# Altium footprint library basicfootprints.PcbLib: 522 footprints (part 5 of 33)
Each footprint in its own frame and in the unit in brackets; x right, y up, seen from the top. Pads: shape width x height; smd on the part's side, far side on the other; paste and mask are expansions set on the pad; w line width, h text height; cw(c..) or ccw(c..) is an arc to the next point about the centre after c.
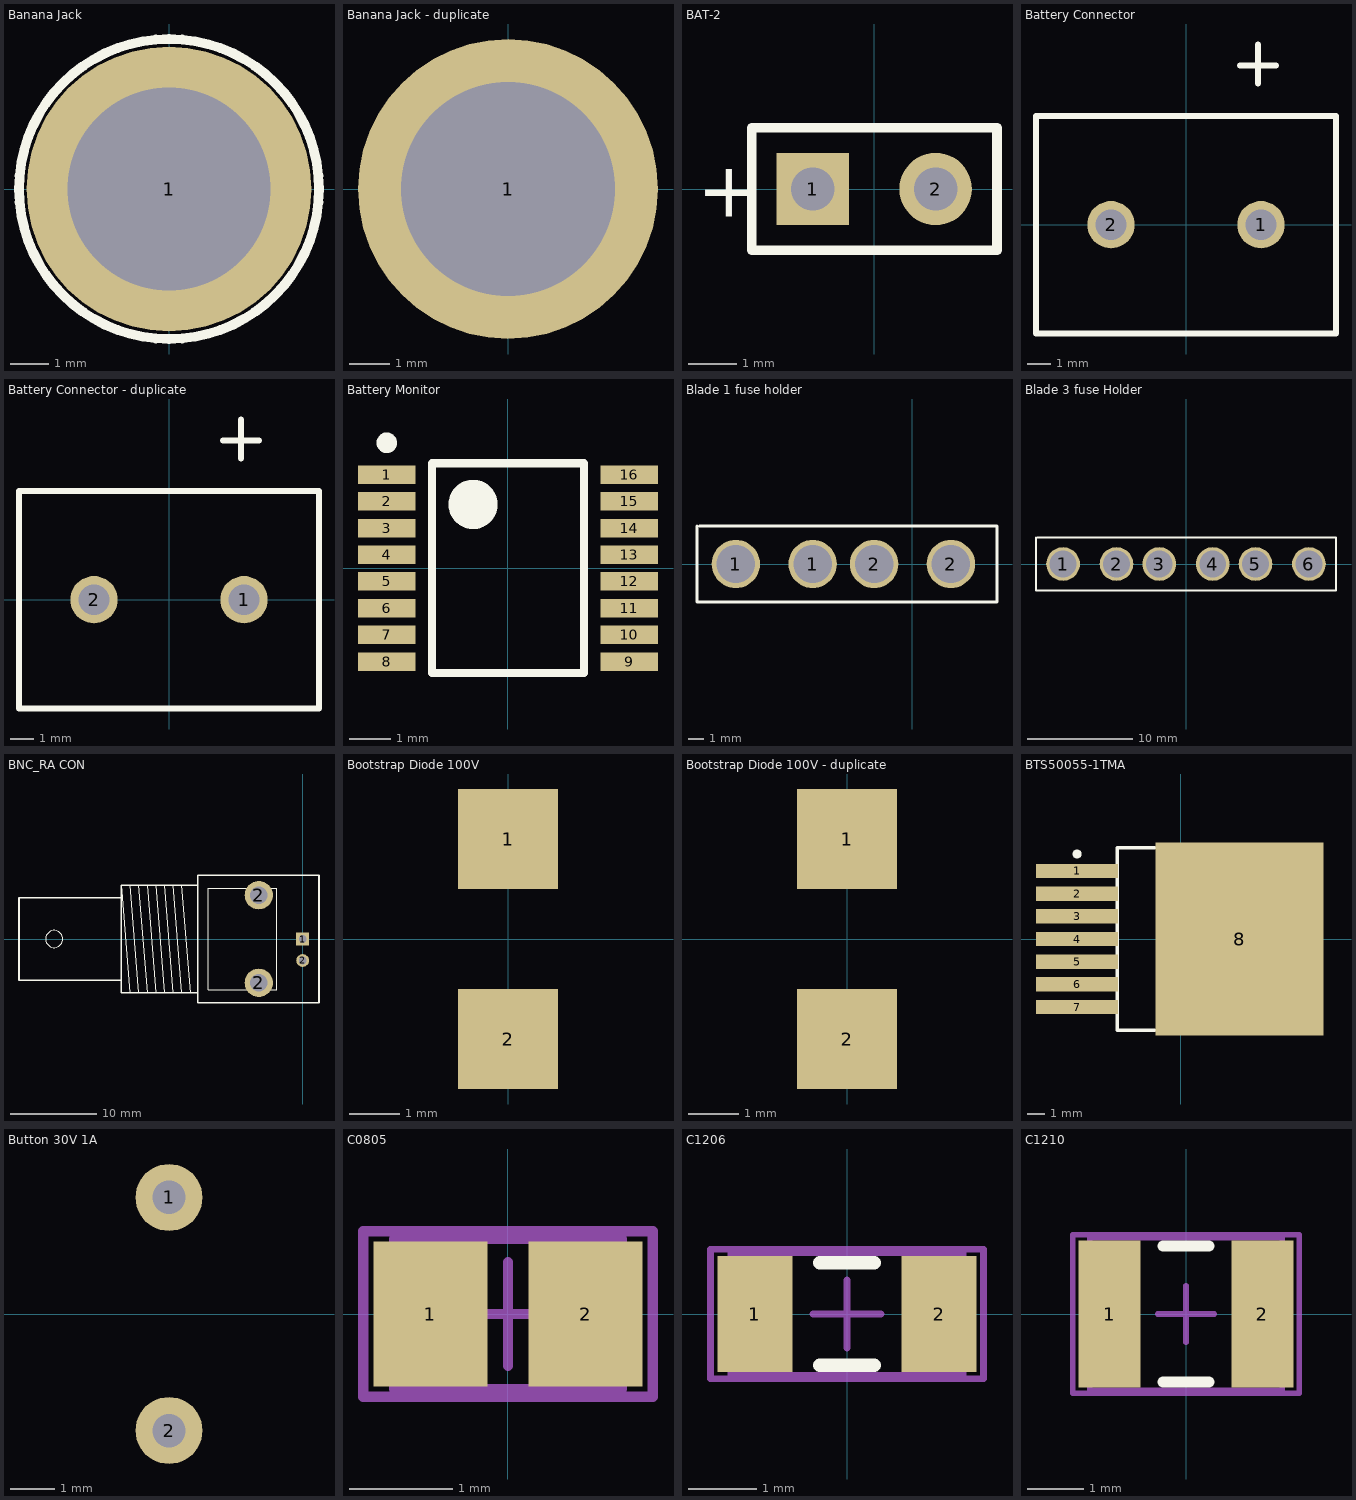
[diagram p4: the footprints below, top view; thin cyan lines are the x and y axes]

## Banana Jack [mm] "575-8"
pads (1):
  round 7.5 hole 5.35: 1(0,0)
Top Overlay:
  circle w0.254: c0,0 r3.95
3D body: height 9, standoff 0.1, extent -2.59,-2.667 2.59,2.523
3D body: height 2.46, standoff 0.1, extent -3.932,-3.947 3.937,3.937
3D body: height 2.47, standoff 0.1, extent -2.59,-2.65 2.59,2.54

## Banana Jack - duplicate [mm] "575-8"
pads (1):
  round 7.5 hole 5.35: 1(0,0)
3D body: height 9, standoff 0.1, extent -2.59,-2.667 2.59,2.523
3D body: height 2.46, standoff 0.1, extent -3.932,-3.947 3.937,3.937
3D body: height 2.47, standoff 0.1, extent -2.59,-2.65 2.59,2.54

## BAT-2 [mm] "Battery; 2 Leads"
pads (2):
  rect 1.5x1.5 hole 0.9: 1(-1.27,0)
  round 1.5 hole 0.9: 2(1.27,0)
Top Overlay:
  lines w0.2: -2.54,-1.27 2.54,-1.27 2.54,1.27 -2.54,1.27 -2.54,-1.27
  text "+" at -3.67,-0.577 h1.15

## Battery Connector [mm] "Phoenix 2-terminal Block Screw connector"
pads (2):
  round 2 hole 1.3: 1(3.175,0) 2(-3.175,0)
Top Overlay:
  lines w0.254: -6.35,-4.572 -6.35,4.572 ; -6.345,-4.6 6.345,-4.6 ; -6.345,4.6 6.345,4.6 ; 2.286,6.731 3.81,6.731 ; 3.048,5.969 3.048,7.62 ; 6.35,-4.572 6.35,4.572
3D body "User Library-2 Way PCB Screw Terminal Block 5mm.step": height 15.2, standoff -3.5, extent -5,-4.301 5,4.699

## Battery Connector - duplicate [mm] "Phoenix 2-terminal Block Screw connector"
pads (2):
  round 2 hole 1.3: 1(3.175,0) 2(-3.175,0)
Top Overlay:
  lines w0.254: -6.35,-4.572 -6.35,4.572 ; -6.345,-4.6 6.345,-4.6 ; -6.345,4.6 6.345,4.6 ; 2.286,6.731 3.81,6.731 ; 3.048,5.969 3.048,7.62 ; 6.35,-4.572 6.35,4.572
3D body "User Library-2 Way PCB Screw Terminal Block 5mm.step": height 15.2, standoff -3.5, extent -5,-4.301 5,4.699

## Battery Monitor [mm] "bq76200"
height 1.2
pads (16):
  rect 1.4x0.45 smd mask+0.05: 1(-2.95,2.275) 2(-2.95,1.625) 3(-2.95,0.975) 4(-2.95,0.325) 5(-2.95,-0.325) 6(-2.95,-0.975) 7(-2.95,-1.625) 8(-2.95,-2.275) 9(2.95,-2.275) 10(2.95,-1.625) 11(2.95,-0.975) 12(2.95,-0.325) 13(2.95,0.325) 14(2.95,0.975) 15(2.95,1.625) 16(2.95,2.275)
Top Overlay:
  circle w0.25: c-2.95,3.05 r0.125
  circle w0.6: c-0.85,1.55 r0.3
  lines w0.2: -1.85,-2.55 -1.85,2.55 1.85,2.55 1.85,-2.55 -1.85,-2.55
3D body: height 1.2, standoff 0.1, extent -2.25,-2.55 2.25,2.55

## Blade 1 fuse holder [mm] "3522-2K-ND"
pads (4):
  round 3.2 hole 2.54: 1(-11.68,0) 1(-6.6,0) 2(-2.54,0) 2(2.54,0)
Top Overlay:
  lines w0.2: -14.25,-2.5 -14.25,2.5 ; -14.224,-2.5 5.588,-2.5 5.588,2.5 -14.097,2.5

## Blade 3 fuse Holder [mm] "3522-3"
pads (6):
  round 3.2 hole 2.54: 1(-11.68,0) 2(-6.6,0) 3(-2.54,0) 4(2.54,0) 5(6.6,0) 6(11.68,0)
Top Overlay:
  lines w0.2: -14.25,-2.5 -14.25,2.5 ; -14.224,-2.5 14.224,-2.5 ; -14.097,2.5 14.224,2.5 ; 14.25,-2.5 14.25,2.5

## BNC_RA CON [mm] "Connector; BNC Elbow"
pads (4):
  rect 1.5x1.5 hole 0.9: 1(0,0)
  round 3.3 hole 2: 2(-5.1,-5.1) 2(-5.1,5.1)
  round 1.5 hole 0.9: 2(0,-2.5)
Top Overlay:
  circle w0.025: c-28.9,0 r1
  lines w0.025: -20.1,-6.25 -21.1,6.25 ; -20.1,6.25 -19.1,-6.25 ; -19.1,6.25 -18.1,-6.25 ; -18.1,6.25 -17.1,-6.25 ; -17.1,6.25 -16.1,-6.25 ; -16.1,6.25 -15.1,-6.25 ; -15.1,6.25 -14.1,-6.25 ; -14.1,6.25 -13.1,-6.25 ; -21.1,-4.8 -33,-4.8 -33,4.8 -21.1,4.8 ; -21.1,-4.8 -21.1,4.8 ; -21.1,-4.8 -21.1,-6.25 -12.2,-6.25 ; -21.1,4.8 -21.1,6.25 ; -21.1,6.25 -12.2,6.25 ; -12.2,-6.25 -12.2,6.25 ; -12.2,-6.25 -12.2,-7.4 1.9,-7.4 1.9,7.4 -12.2,7.4 -12.2,6.25 ; -11,-5.9 -3,-5.9 -3,5.9 -11,5.9 -11,-5.9
  lines w0.2: -21.1,-4.8 -21.1,4.8 ; -21.1,-4.8 -33,-4.8 -33,4.8 -21.1,4.8 ; -21.1,-4.8 -21.1,-6.25 -12.2,-6.25 ; -21.1,4.8 -21.1,6.25 -12.2,6.25 ; -12.2,-6.25 -12.2,6.25 ; -12.2,-6.25 -12.2,-7.4 1.9,-7.4 1.9,7.4 -12.2,7.4 -12.2,6.25

## Bootstrap Diode 100V [mm] "MURA110T3G  ULTRAFAST DIODE"
pads (2):
  rect 2x2 smd: 1(0,2) 2(0,-2)

## Bootstrap Diode 100V - duplicate [mm] "MURA110T3G  ULTRAFAST DIODE"
pads (2):
  rect 2x2 smd: 1(0,2) 2(0,-2)

## BTS50055-1TMA [mm] "Highside Current Power Switch"
height 4.4
pads (8):
  rect 4.6x0.8 smd: 1(-5.8,3.81) 2(-5.8,2.54) 3(-5.8,1.27) 4(-5.8,0) 5(-5.8,-1.27) 6(-5.8,-2.54) 7(-5.8,-3.81)
  rect 9.4x10.8 smd: 8(3.3,0)
Top Overlay:
  circle w0.25: c-5.8,4.76 r0.125
  lines w0.2: -1.45,-5.1 -3.55,-5.1 -3.55,5.1 -1.45,5.1
3D body: height 4.4, standoff 0.1, extent -3.55,-5.1 5.9,5.1

## Button 30V 1A [mil] "GPTS203211B"
pads (2):
  round 60 hole 30: 1(255.91,104.33) 2(255.91,-104.33)
3D body: height 362.2, standoff 3.94, extent -104.32,-104.28 104.34,104.29
3D body: height 255.91, standoff 0, extent -255,-255 255,255

## C0805 [mm] "Chip Capacitor, Body 2.0x1.3mm, IPC High Density"
height 1.4
pads (2):
  rect 1.1x1.4 smd: 1(-0.75,0) 2(0.75,0)
Mechanical 13:
  lines w0.1: -1.1,-0.725 -1.1,0.725 1.1,0.725 1.1,-0.725 -1.1,-0.725
Mechanical 15:
  lines w0.1: -0.5,0 0.5,0 ; 0,-0.5 0,0.5 ; -1.4,-0.8 -1.4,0.8 1.4,0.8 1.4,-0.8 -1.4,-0.8
3D body: height 1.4, standoff 0, extent -1.1,-0.725 1.1,0.725

## C1206 [mm] "Chip Capacitor, Body 3.2x1.6mm, IPC High Density"
height 1.3
pads (2):
  rect 1.1x1.7 smd: 1(-1.35,0) 2(1.35,0)
Top Overlay:
  lines w0.2: -0.4,-0.75 0.4,-0.75 ; -0.4,0.75 0.4,0.75
Mechanical 13:
  lines w0.1: -1.7,-0.9 -1.7,0.9 1.7,0.9 1.7,-0.9 -1.7,-0.9
Mechanical 15:
  lines w0.1: -0.5,0 0.5,0 ; 0,-0.5 0,0.5 ; -2,-0.95 -2,0.95 2,0.95 2,-0.95 -2,-0.95
3D body: height 1.3, standoff 0, extent -1.7,-0.9 1.7,0.9

## C1210 [mm] "Chip Capacitor, Body 3.2x2.5mm, IPC High Density"
height 1.3
pads (2):
  rect 1.1x2.6 smd: 1(-1.35,0) 2(1.35,0)
Top Overlay:
  lines w0.2: -0.4,-1.2 0.4,-1.2 ; -0.4,1.2 0.4,1.2
Mechanical 13:
  lines w0.1: -1.7,-1.35 -1.7,1.35 1.7,1.35 1.7,-1.35 -1.7,-1.35
Mechanical 15:
  lines w0.1: -0.5,0 0.5,0 ; 0,-0.5 0,0.5 ; -2,-1.4 -2,1.4 2,1.4 2,-1.4 -2,-1.4
3D body: height 1.3, standoff 0, extent -1.7,-1.35 1.7,1.35